# Altium footprint library Miscellaneous Header.PcbLib: 164 footprints (part 4 of 11)
Each footprint in its own frame and in the unit in brackets; x right, y up, seen from the top. Pads: shape width x height; smd on the part's side, far side on the other; paste and mask are expansions set on the pad; w line width, h text height; cw(c..) or ccw(c..) is an arc to the next point about the centre after c.
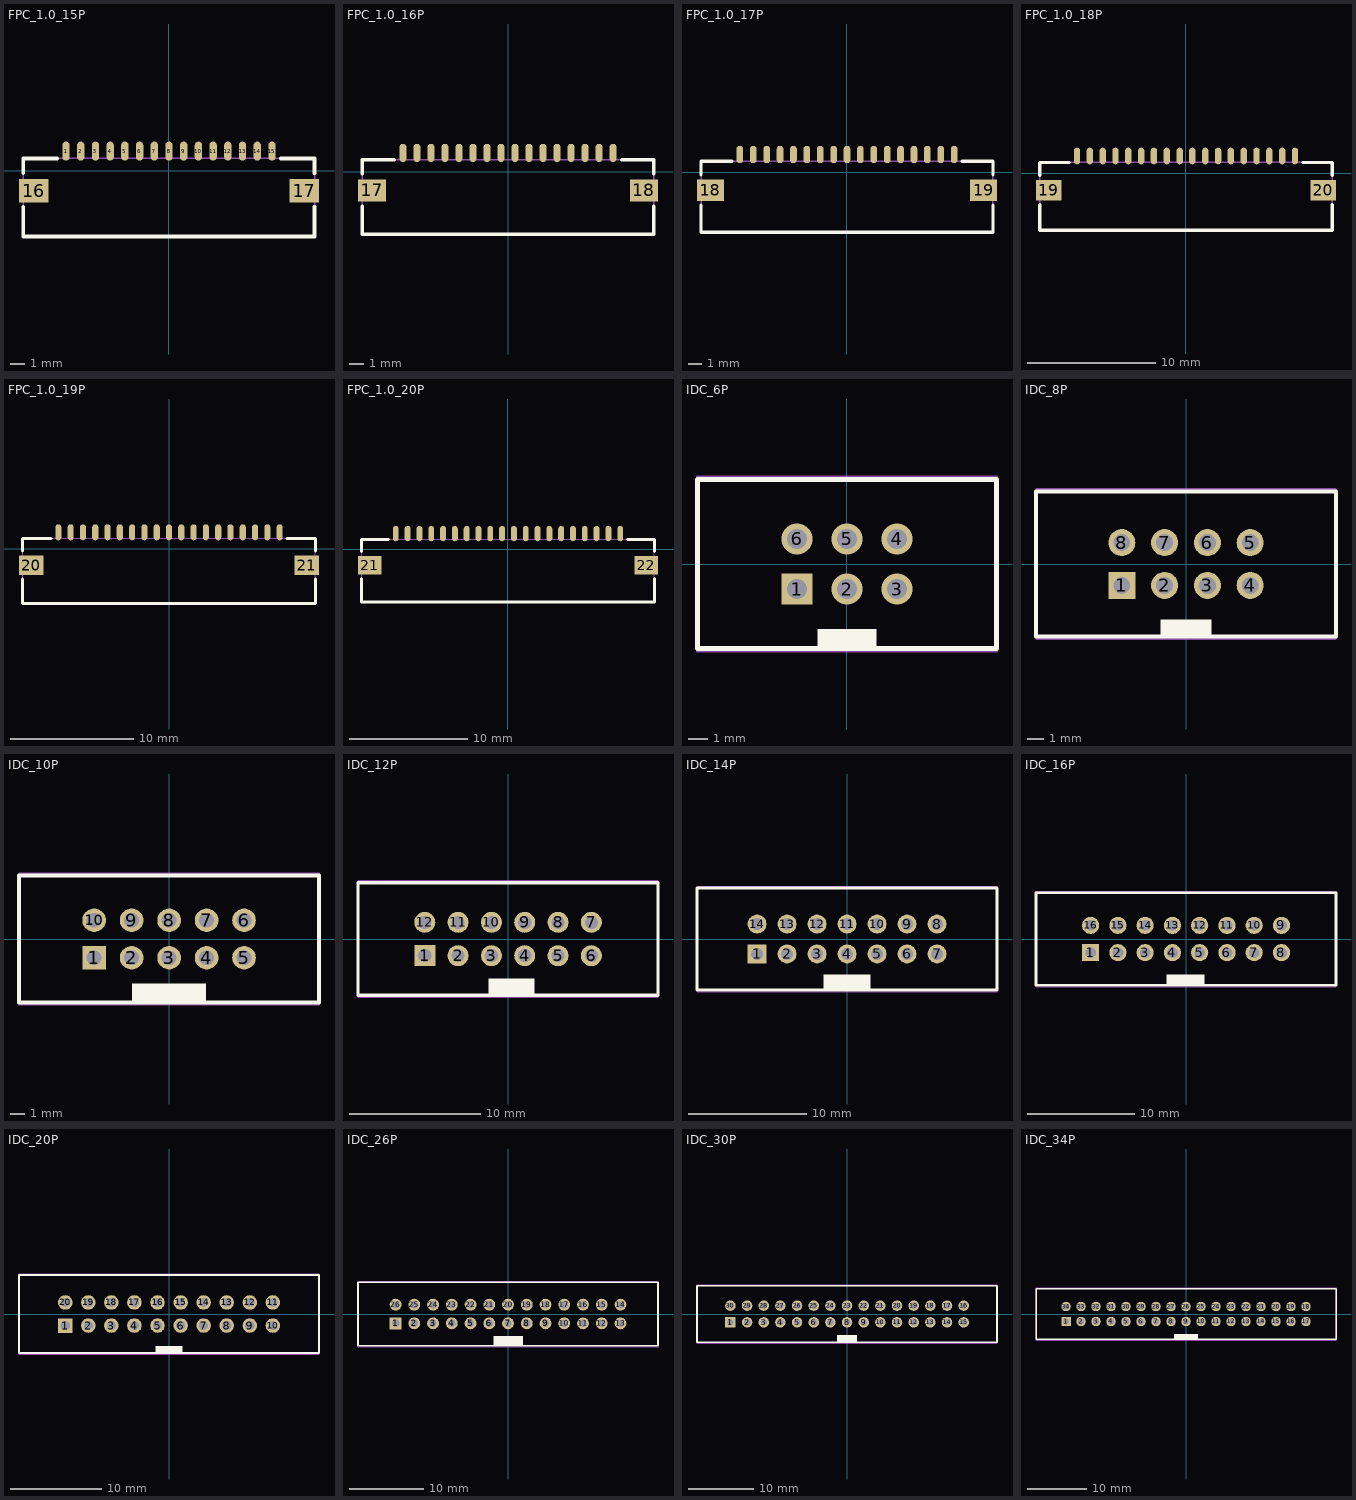
[diagram p3: the footprints below, top view; thin cyan lines are the x and y axes]

## FPC_1.0_15P [mm]
pads (17):
  oval 0.5x1.3 smd: 1(-7,1.34) 2(-6,1.34) 3(-5,1.34) 4(-4,1.34) 5(-3,1.34) 6(-2,1.34) 7(-1,1.34) 8(0,1.34) 9(1,1.34) 10(2,1.34) 11(3,1.34) 12(4,1.34) 13(5,1.34) 14(6,1.34) 15(7,1.34)
  rect 2x1.6 smd: 16(-9.2,-1.34) 17(9.2,-1.34)
Top Overlay:
  lines w0.25: -9.9,-2.46 -9.9,-4.46 9.9,-4.46 9.9,-2.46 ; -9.9,-0.16 -9.9,0.84 -7.6,0.84 ; 7.6,0.84 9.9,0.84 9.9,-0.16
Mechanical 15:
  lines w0.1: -9.9,-4.46 9.9,-4.46 9.9,0.84 -9.9,0.84 -9.9,-4.46
3D body: height 2.2, standoff -0.05, extent -9.8,-4.86 9.8,1.639

## FPC_1.0_16P [mm]
pads (18):
  oval 0.5x1.3 smd: 1(-7.5,1.34) 2(-6.5,1.34) 3(-5.5,1.34) 4(-4.5,1.34) 5(-3.5,1.34) 6(-2.5,1.34) 7(-1.5,1.34) 8(-0.5,1.34) 9(0.5,1.34) 10(1.5,1.34) 11(2.5,1.34) 12(3.5,1.34) 13(4.5,1.34) 14(5.5,1.34) 15(6.5,1.34) 16(7.5,1.34)
  rect 2x1.6 smd: 17(-9.7,-1.34) 18(9.7,-1.34)
Top Overlay:
  lines w0.25: -10.4,-2.46 -10.4,-4.46 10.4,-4.46 10.4,-2.46 ; -10.4,-0.16 -10.4,0.84 -8.1,0.84 ; 8.1,0.84 10.4,0.84 10.4,-0.16
Mechanical 15:
  lines w0.1: -10.4,-4.46 -10.4,0.84 10.4,0.84 10.4,-4.46 -10.4,-4.46
3D body: height 2.2, standoff -0.05, extent -10.3,-4.86 10.3,1.639

## FPC_1.0_17P [mm]
pads (19):
  oval 0.5x1.3 smd: 1(-8,1.34) 2(-7,1.34) 3(-6,1.34) 4(-5,1.34) 5(-4,1.34) 6(-3,1.34) 7(-2,1.34) 8(-1,1.34) 9(0,1.34) 10(1,1.34) 11(2,1.34) 12(3,1.34) 13(4,1.34) 14(5,1.34) 15(6,1.34) 16(7,1.34) 17(8,1.34)
  rect 2x1.6 smd: 18(-10.2,-1.34) 19(10.2,-1.34)
Top Overlay:
  lines w0.25: -10.9,-2.46 -10.9,-4.46 10.9,-4.46 10.9,-2.46 ; -10.9,-0.16 -10.9,0.84 -8.6,0.84 ; 8.6,0.84 10.9,0.84 10.9,-0.16
Mechanical 15:
  lines w0.1: -10.9,-4.46 10.9,-4.46 10.9,0.84 -10.9,0.84 -10.9,-4.46
3D body: height 2.2, standoff -0.05, extent -10.8,-4.86 10.8,1.639

## FPC_1.0_18P [mm]
pads (20):
  oval 0.5x1.3 smd: 1(-8.5,1.34) 2(-7.5,1.34) 3(-6.5,1.34) 4(-5.5,1.34) 5(-4.5,1.34) 6(-3.5,1.34) 7(-2.5,1.34) 8(-1.5,1.34) 9(-0.5,1.34) 10(0.5,1.34) 11(1.5,1.34) 12(2.5,1.34) 13(3.5,1.34) 14(4.5,1.34) 15(5.5,1.34) 16(6.5,1.34) 17(7.5,1.34) 18(8.5,1.34)
  rect 2x1.6 smd: 19(-10.7,-1.34) 20(10.7,-1.34)
Top Overlay:
  lines w0.25: -11.4,-2.46 -11.4,-4.46 11.4,-4.46 11.4,-2.46 ; -11.4,-0.16 -11.4,0.84 -9.1,0.84 ; 9.1,0.84 11.4,0.84 11.4,-0.16
Mechanical 15:
  lines w0.1: -11.4,-4.46 -11.4,0.84 11.4,0.84 11.4,-4.46 -11.4,-4.46
3D body: height 2.2, standoff -0.05, extent -11.3,-4.86 11.3,1.639

## FPC_1.0_19P [mm]
pads (21):
  oval 0.5x1.3 smd: 1(-9,1.34) 2(-8,1.34) 3(-7,1.34) 4(-6,1.34) 5(-5,1.34) 6(-4,1.34) 7(-3,1.34) 8(-2,1.34) 9(-1,1.34) 10(0,1.34) 11(1,1.34) 12(2,1.34) 13(3,1.34) 14(4,1.34) 15(5,1.34) 16(6,1.34) 17(7,1.34) 18(8,1.34) 19(9,1.34)
  rect 2x1.6 smd: 20(-11.2,-1.34) 21(11.2,-1.34)
Top Overlay:
  lines w0.25: -11.9,-2.46 -11.9,-4.46 11.9,-4.46 11.9,-2.46 ; -11.9,-0.16 -11.9,0.84 -9.6,0.84 ; 9.6,0.84 11.9,0.84 11.9,-0.16
Mechanical 15:
  lines w0.1: -11.9,-4.46 -11.9,0.84 11.9,0.84 11.9,-4.46 -11.9,-4.46
3D body: height 2.2, standoff -0.05, extent -11.8,-4.86 11.8,1.639

## FPC_1.0_20P [mm]
pads (22):
  oval 0.5x1.3 smd: 1(-9.5,1.34) 2(-8.5,1.34) 3(-7.5,1.34) 4(-6.5,1.34) 5(-5.5,1.34) 6(-4.5,1.34) 7(-3.5,1.34) 8(-2.5,1.34) 9(-1.5,1.34) 10(-0.5,1.34) 11(0.5,1.34) 12(1.5,1.34) 13(2.5,1.34) 14(3.5,1.34) 15(4.5,1.34) 16(5.5,1.34) 17(6.5,1.34) 18(7.5,1.34) 19(8.5,1.34) 20(9.5,1.34)
  rect 2x1.6 smd: 21(-11.7,-1.34) 22(11.7,-1.34)
Top Overlay:
  lines w0.25: -12.4,-2.46 -12.4,-4.46 12.4,-4.46 12.4,-2.46 ; -12.4,-0.16 -12.4,0.84 -10.1,0.84 ; 10.1,0.84 12.4,0.84 12.4,-0.16
Mechanical 15:
  lines w0.1: -12.4,-4.46 -12.4,0.84 12.4,0.84 12.4,-4.46 -12.4,-4.46
3D body: height 2.2, standoff -0.05, extent -12.3,-4.86 12.3,1.639

## IDC_6P [mm]
pads (6):
  rect 1.6x1.6 hole 1: 1(-2.54,-1.27)
  round 1.6 hole 1: 2(0,-1.27) 3(2.54,-1.27) 4(2.54,1.27) 5(0,1.27) 6(-2.54,1.27)
Top Overlay:
  rectangle: -1.5,-4.3 1.5,-3.3
  lines w0.254: -7.6,-4.3 -7.6,4.3 7.6,4.3 7.6,-4.3 -7.6,-4.3
Mechanical 15:
  lines w0.1: -7.62,-4.45 -7.62,4.45 7.62,4.45 7.62,-4.45 -7.62,-4.45
3D body: height 8.93, standoff -3.17, extent -7.62,-4.45 7.62,4.45

## IDC_8P [mm]
pads (8):
  rect 1.6x1.6 hole 1: 1(-3.81,-1.27)
  round 1.6 hole 1: 2(-1.27,-1.27) 3(1.27,-1.27) 4(3.81,-1.27) 5(3.81,1.27) 6(1.27,1.27) 7(-1.27,1.27) 8(-3.81,1.27)
Top Overlay:
  rectangle: -1.5,-4.3 1.5,-3.3
  lines w0.254: -8.9,-4.3 -8.9,4.3 8.9,4.3 8.9,-4.3 -8.9,-4.3
Mechanical 15:
  lines w0.1: -8.89,-4.45 -8.89,4.45 8.89,4.45 8.89,-4.45 -8.89,-4.45
3D body: height 8.98, standoff -3.17, extent -8.89,-4.45 8.89,4.75

## IDC_10P [mm]
pads (10):
  rect 1.6x1.6 hole 1: 1(-5.08,-1.27)
  round 1.6 hole 1: 2(-2.54,-1.27) 3(0,-1.27) 4(2.54,-1.27) 5(5.08,-1.27) 6(5.08,1.27) 7(2.54,1.27) 8(0,1.27) 9(-2.54,1.27) 10(-5.08,1.27)
Top Overlay:
  rectangle: -2.5,-4.3 2.5,-3
  lines w0.254: -10.17,-4.3 10.16,-4.3 10.16,4.3 -10.17,4.3 -10.17,-4.3
Mechanical 15:
  lines w0.1: -10.16,-4.45 -10.16,4.45 10.16,4.45 10.16,-4.45 -10.16,-4.45
3D body: height 9.1, standoff -3, extent -10.26,-4.58 10.24,4.72

## IDC_12P [mm]
pads (12):
  rect 1.6x1.6 hole 1: 1(-6.35,-1.27)
  round 1.6 hole 1: 2(-3.81,-1.27) 3(-1.27,-1.27) 4(1.27,-1.27) 5(3.81,-1.27) 6(6.35,-1.27) 7(6.35,1.27) 8(3.81,1.27) 9(1.27,1.27) 10(-1.27,1.27) 11(-3.81,1.27) 12(-6.35,1.27)
Top Overlay:
  rectangle: -1.5,-4.3 2,-3
  lines w0.254: -11.44,-4.3 11.43,-4.3 11.43,4.3 -11.44,4.3 -11.44,-4.3
Mechanical 15:
  lines w0.1: -11.43,-4.45 11.43,-4.45 11.43,4.45 -11.43,4.45 -11.43,-4.45
3D body: height 9.1, standoff -3, extent -11.52,-4.6 11.52,4.7

## IDC_14P [mm]
pads (14):
  rect 1.6x1.6 hole 1: 1(-7.62,-1.27)
  round 1.6 hole 1: 2(-5.08,-1.27) 3(-2.54,-1.27) 4(0,-1.27) 5(2.54,-1.27) 6(5.08,-1.27) 7(7.62,-1.27) 8(7.62,1.27) 9(5.08,1.27) 10(2.54,1.27) 11(0,1.27) 12(-2.54,1.27) 13(-5.08,1.27) 14(-7.62,1.27)
Top Overlay:
  rectangle: -2,-4.3 2,-3
  lines w0.254: -12.71,-4.3 -12.71,4.3 12.7,4.3 12.7,-4.3 -12.71,-4.3
Mechanical 15:
  lines w0.1: -12.7,-4.45 -12.7,4.45 12.7,4.45 12.7,-4.45 -12.7,-4.45
3D body: height 9.1, standoff -3, extent -12.8,-4.6 12.78,4.7

## IDC_16P [mm]
pads (16):
  rect 1.6x1.6 hole 1: 1(-8.89,-1.27)
  round 1.6 hole 1: 2(-6.35,-1.27) 3(-3.81,-1.27) 4(-1.27,-1.27) 5(1.27,-1.27) 6(3.81,-1.27) 7(6.35,-1.27) 8(8.89,-1.27) 9(8.89,1.27) 10(6.35,1.27) 11(3.81,1.27) 12(1.27,1.27) 13(-1.27,1.27) 14(-3.81,1.27) 15(-6.35,1.27) 16(-8.89,1.27)
Top Overlay:
  rectangle: -1.8,-4.33 1.7,-3.3
  lines w0.254: -13.98,-4.3 13.97,-4.3 13.97,4.3 -13.98,4.3 -13.98,-4.3
Mechanical 15:
  lines w0.1: -13.97,-4.45 13.97,-4.45 13.97,4.45 -13.97,4.45 -13.97,-4.45
3D body: height 9.1, standoff -3, extent -14.05,-4.57 14.07,4.73

## IDC_20P [mm]
pads (20):
  rect 1.6x1.6 hole 1: 1(-11.43,-1.27)
  round 1.6 hole 1: 2(-8.89,-1.27) 3(-6.35,-1.27) 4(-3.81,-1.27) 5(-1.27,-1.27) 6(1.27,-1.27) 7(3.81,-1.27) 8(6.35,-1.27) 9(8.89,-1.27) 10(11.43,-1.27) 11(11.43,1.27) 12(8.89,1.27) 13(6.35,1.27) 14(3.81,1.27) 15(1.27,1.27) 16(-1.27,1.27) 17(-3.81,1.27) 18(-6.35,1.27) 19(-8.89,1.27) 20(-11.43,1.27)
Top Overlay:
  rectangle: -1.5,-4.3 1.5,-3.5
  lines w0.254: -16.52,-4.3 -16.52,4.3 16.51,4.3 16.51,-4.3 -16.52,-4.3
Mechanical 15:
  lines w0.1: -16.51,-4.45 -16.51,4.45 16.51,4.45 16.51,-4.45 -16.51,-4.45
3D body: height 9.1, standoff -3, extent -16.6,-4.5 16.6,4.8

## IDC_26P [mm]
pads (26):
  rect 1.6x1.6 hole 1: 1(-15.24,-1.27)
  round 1.6 hole 1: 2(-12.7,-1.27) 3(-10.16,-1.27) 4(-7.62,-1.27) 5(-5.08,-1.27) 6(-2.54,-1.27) 7(0,-1.27) 8(2.54,-1.27) 9(5.08,-1.27) 10(7.62,-1.27) 11(10.16,-1.27) 12(12.7,-1.27) 13(15.24,-1.27) 14(15.24,1.27) 15(12.7,1.27) 16(10.16,1.27) 17(7.62,1.27) 18(5.08,1.27) 19(2.54,1.27) 20(0,1.27) 21(-2.54,1.27) 22(-5.08,1.27) 23(-7.62,1.27) 24(-10.16,1.27) 25(-12.7,1.27) 26(-15.24,1.27)
Top Overlay:
  rectangle: -2,-4.3 2,-3
  lines w0.254: -20.33,-4.3 -20.33,4.3 20.32,4.3 20.32,-4.3 -20.33,-4.3
Mechanical 15:
  lines w0.1: -20.32,-4.45 -20.32,4.45 20.32,4.45 20.32,-4.45 -20.32,-4.45
3D body: height 9.1, standoff -3, extent -20.41,-4.5 20.41,4.8

## IDC_30P [mm]
pads (30):
  rect 1.6x1.6 hole 1: 1(-17.78,-1.27)
  round 1.6 hole 1: 2(-15.24,-1.27) 3(-12.7,-1.27) 4(-10.16,-1.27) 5(-7.62,-1.27) 6(-5.08,-1.27) 7(-2.54,-1.27) 8(0,-1.27) 9(2.54,-1.27) 10(5.08,-1.27) 11(7.62,-1.27) 12(10.16,-1.27) 13(12.7,-1.27) 14(15.24,-1.27) 15(17.78,-1.27) 16(17.78,1.27) 17(15.24,1.27) 18(12.7,1.27) 19(10.16,1.27) 20(7.62,1.27) 21(5.08,1.27) 22(2.54,1.27) 23(0,1.27) 24(-2.54,1.27) 25(-5.08,1.27) 26(-7.62,1.27) 27(-10.16,1.27) 28(-12.7,1.27) 29(-15.24,1.27) 30(-17.78,1.27)
Top Overlay:
  rectangle: -1.5,-4.3 1.5,-3.2
  lines w0.254: -22.87,-4.3 22.86,-4.3 22.86,4.3 -22.87,4.3 -22.87,-4.3
Mechanical 15:
  lines w0.1: -22.86,-4.45 22.86,-4.45 22.86,4.45 -22.86,4.45 -22.86,-4.45
3D body: height 9.1, standoff -3, extent -22.9,-4.6 23,4.7

## IDC_34P [mm]
pads (34):
  rect 1.6x1.6 hole 1: 1(-20.32,-1.27)
  round 1.6 hole 1: 2(-17.78,-1.27) 3(-15.24,-1.27) 4(-12.7,-1.27) 5(-10.16,-1.27) 6(-7.62,-1.27) 7(-5.08,-1.27) 8(-2.54,-1.27) 9(0,-1.27) 10(2.54,-1.27) 11(5.08,-1.27) 12(7.62,-1.27) 13(10.16,-1.27) 14(12.7,-1.27) 15(15.24,-1.27) 16(17.78,-1.27) 17(20.32,-1.27) 18(20.32,1.27) 19(17.78,1.27) 20(15.24,1.27) 21(12.7,1.27) 22(10.16,1.27) 23(7.62,1.27) 24(5.08,1.27) 25(2.54,1.27) 26(0,1.27) 27(-2.54,1.27) 28(-5.08,1.27) 29(-7.62,1.27) 30(-10.16,1.27) 31(-12.7,1.27) 32(-15.24,1.27) 33(-17.78,1.27) 34(-20.32,1.27)
Top Overlay:
  rectangle: -2,-4.3 2,-3.4
  lines w0.254: -25.41,-4.3 25.4,-4.3 25.4,4.3 -25.41,4.3 -25.41,-4.3
Mechanical 15:
  lines w0.1: -25.4,-4.45 25.4,-4.45 25.4,4.45 -25.4,4.45 -25.4,-4.45
3D body: height 9.1, standoff -3, extent -25.49,-4.5 25.49,4.8